# Altium footprint library Footprints.PcbLib: 7 footprints
Each footprint in its own frame and in the unit in brackets; x right, y up, seen from the top. Pads: shape width x height; smd on the part's side, far side on the other; paste and mask are expansions set on the pad; w line width, h text height; cw(c..) or ccw(c..) is an arc to the next point about the centre after c.
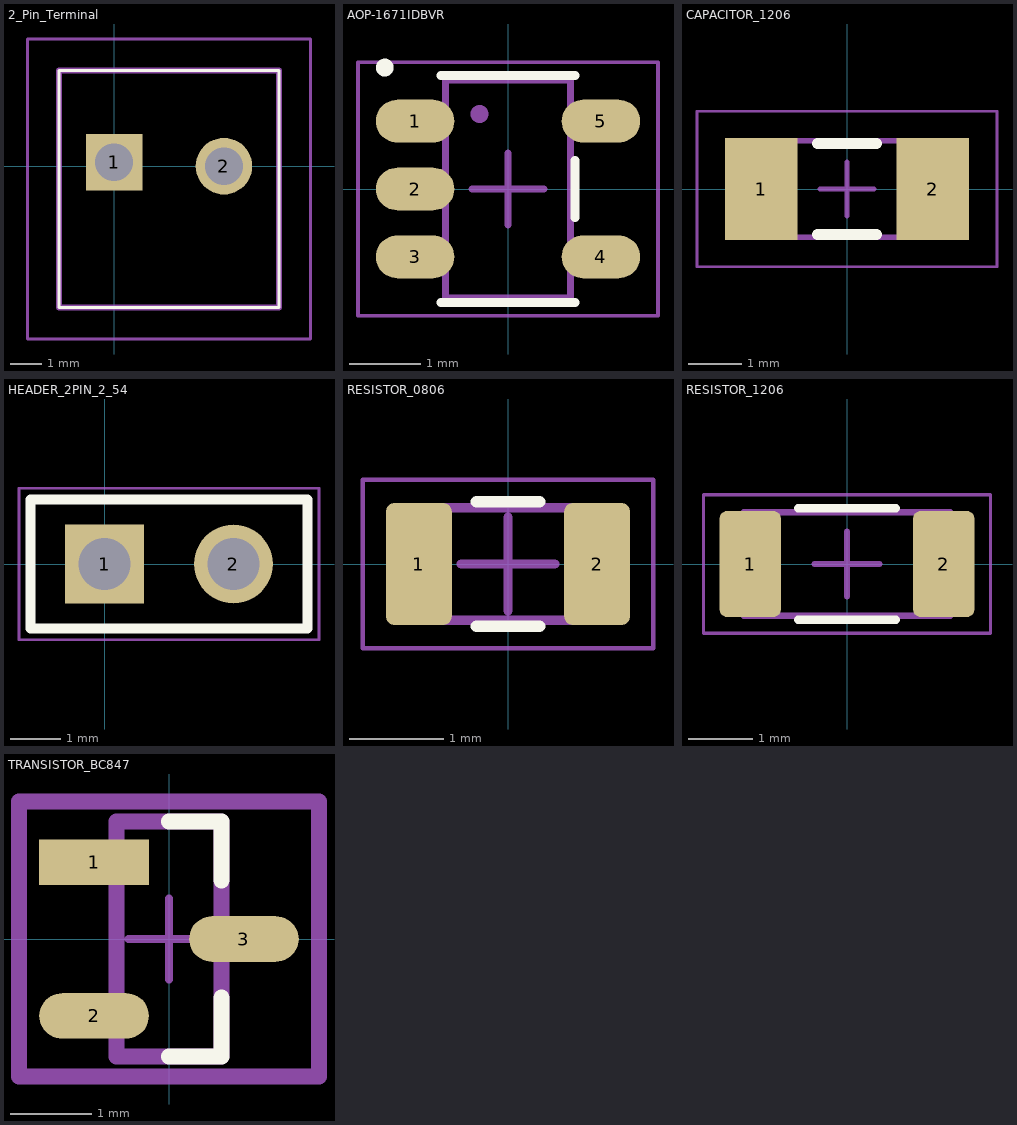
[diagram p0: the footprints below, top view; thin cyan lines are the x and y axes]

## 2_Pin_Terminal [mm]
pads (2):
  rect 1.8x1.8 hole 1.2: 1(0,0.127)
  round 1.8 hole 1.2: 2(3.5,0)
Top Overlay:
  lines w0.1: -1.75,-4.5 -1.75,3.05 5.25,3.05 5.25,-4.5 -1.75,-4.5
Mechanical 15:
  lines w0.2: -1.75,-4.5 -1.75,3.05 5.25,3.05 5.25,-4.5 -1.75,-4.5
Bottom Assembly:
  lines w0.1: -2.75,-5.5 -2.75,4.05 6.25,4.05 6.25,-5.5 -2.75,-5.5

## AOP-1671IDBVR [mm]
height 1.45
pads (5):
  oval 1.1x0.6 smd: 1(-1.3,0.95) 2(-1.3,0) 3(-1.3,-0.95) 4(1.3,-0.95) 5(1.3,0.95)
Top Overlay:
  circle w0.125: c-1.725,1.7 r0.062
  lines w0.127: -0.938,-1.588 0.938,-1.588 ; -0.938,1.589 0.938,1.589 ; 0.938,-0.398 0.938,0.398
Top Courtyard:
  lines w0.05: -2.1,-1.775 2.1,-1.775 2.1,1.775 -2.1,1.775 -2.1,-1.775
  lines w0.1: -0.5,0 0.5,0 ; 0,-0.5 0,0.5
Top Assembly:
  circle w0.125: c-0.4,1.05 r0.062
  lines w0.1: -0.875,-1.525 0.875,-1.525 0.875,1.525 -0.875,1.525 -0.875,-1.525
3D body: height 1.45, standoff 0, extent -0.875,-1.525 0.875,1.525

## CAPACITOR_1206 [mm] "Chip Capacitor, Body 3.2x1.6mm, Height 1.7mm, IPC Low Density"
height 1.7
pads (2):
  rect 1.35x1.9 smd: 1(-1.6,0) 2(1.6,0)
Top Overlay:
  lines w0.2: -0.55,-0.85 0.55,-0.85 ; -0.55,0.85 0.55,0.85
Mechanical 13:
  lines w0.1: -1.7,-0.9 -1.7,0.9 1.7,0.9 1.7,-0.9 -1.7,-0.9
Mechanical 15:
  lines w0.05: -2.8,-1.45 -2.8,1.45 2.8,1.45 2.8,-1.45 -2.8,-1.45
  lines w0.1: -0.5,0 0.5,0 ; 0,-0.5 0,0.5
3D body: height 1.7, standoff 0, extent -1.2,-0.9 1.2,0.9
3D body: height 1.7, standoff 0, extent -1.7,-0.9 -1.2,0.9
3D body: height 1.7, standoff 0, extent 1.2,-0.9 1.7,0.9

## HEADER_2PIN_2_54 [mm] ".025 SQ Post Terminal Strip Assembly, 1x2 Pins, Vertical, 2.54mm Pitch, Male"
height 8.58
pads (2):
  rect 1.55x1.55 hole 1.02: 1(0,0)
  round 1.55 hole 1.02: 2(2.54,0)
Top Overlay:
  lines w0.2: -1.46,-1.27 -1.46,1.27 4,1.27 4,-1.27 -1.46,-1.27
Mechanical 13:
  lines w0.1: -1.46,-1.27 -1.46,1.27 4,1.27 4,-1.27 -1.46,-1.27
Mechanical 15:
  lines w0.05: -1.685,-1.495 -1.685,1.495 4.225,1.495 4.225,-1.495 -1.685,-1.495
3D body "TSW-102-26-XX-S.step": height 8.38, standoff -3.2, extent -1.397,-1.271 3.81,1.27

## RESISTOR_0806 [mm]
height 0.45
pads (2):
  rrect25% 0.7x1.3 smd: 1(-0.95,0) 2(0.95,0)
Top Overlay:
  lines w0.127: -0.337,-0.663 0.336,-0.663 ; -0.337,0.664 0.336,0.664
Mechanical 13:
  lines w0.1: -1,-0.6 -1,0.6 1,0.6 1,-0.6 -1,-0.6
Mechanical 15:
  lines w0.05: -1.55,-0.9 -1.55,0.9 1.55,0.9 1.55,-0.9 -1.55,-0.9
  lines w0.1: -0.5,0 0.5,0 ; 0,-0.5 0,0.5
3D body: height 0.45, standoff 0, extent -0.55,-0.6 0.55,0.6
3D body: height 0.45, standoff 0, extent -1,-0.6 -0.55,0.6
3D body: height 0.45, standoff 0, extent 0.55,-0.6 1,0.6

## RESISTOR_1206 [mm]
height 0.55
pads (2):
  rrect25% 0.95x1.65 smd: 1(-1.5,0) 2(1.5,0)
Top Overlay:
  lines w0.127: -0.761,-0.864 0.761,-0.864 ; -0.761,0.863 0.761,0.863
Mechanical 13:
  lines w0.1: -1.6,-0.8 -1.6,0.8 1.6,0.8 1.6,-0.8 -1.6,-0.8
Mechanical 15:
  lines w0.05: -2.225,-1.075 -2.225,1.075 2.225,1.075 2.225,-1.075 -2.225,-1.075
  lines w0.1: -0.5,0 0.5,0 ; 0,-0.5 0,0.5
3D body: height 0.55, standoff 0, extent -1.05,-0.8 1.05,0.8
3D body: height 0.55, standoff 0, extent -1.6,-0.8 -1.05,0.8
3D body: height 0.55, standoff 0, extent 1.05,-0.8 1.6,0.8

## TRANSISTOR_BC847 [mm]
pads (3):
  rect 1.355x0.562 smd paste+0 mask+0: 1(-0.925,0.95)
  rrect100% 1.355x0.562 smd paste+0 mask+0: 2(-0.925,-0.95) 3(0.925,0)
Top Overlay:
  lines w0.2: 0,-1.45 0.65,-1.45 0.65,-0.725 ; 0,1.45 0.65,1.45 0.65,0.725
Top 3D Body:
  lines w0.2: -0.65,-1.45 -0.65,1.45 0.65,1.45 0.65,-1.45 -0.65,-1.45
Top Courtyard:
  lines w0.2: -1.853,-1.7 -1.853,1.7 1.853,1.7 1.853,-1.7 -1.853,-1.7
Top Assembly:
  lines w0.2: -1.853,-1.7 -1.853,1.7 1.853,1.7 1.853,-1.7 -1.853,-1.7
  text ".Designator" at 0,-0.001 h1
Top Component Center:
  lines w0.1: -0.5,0 0.5,0 ; 0,-0.5 0,0.5
3D body "Trans_Nexperia_PMV20ENR_eec.STEP": height 0.25, standoff 0, extent -1.853,-1.7 1.853,1.7